# Altium footprint library Miscellaneous$.PcbLib: 44 footprints (part 2 of 3)
Each footprint in its own frame and in the unit in brackets; x right, y up, seen from the top. Pads: shape width x height; smd on the part's side, far side on the other; paste and mask are expansions set on the pad; w line width, h text height; cw(c..) or ccw(c..) is an arc to the next point about the centre after c.
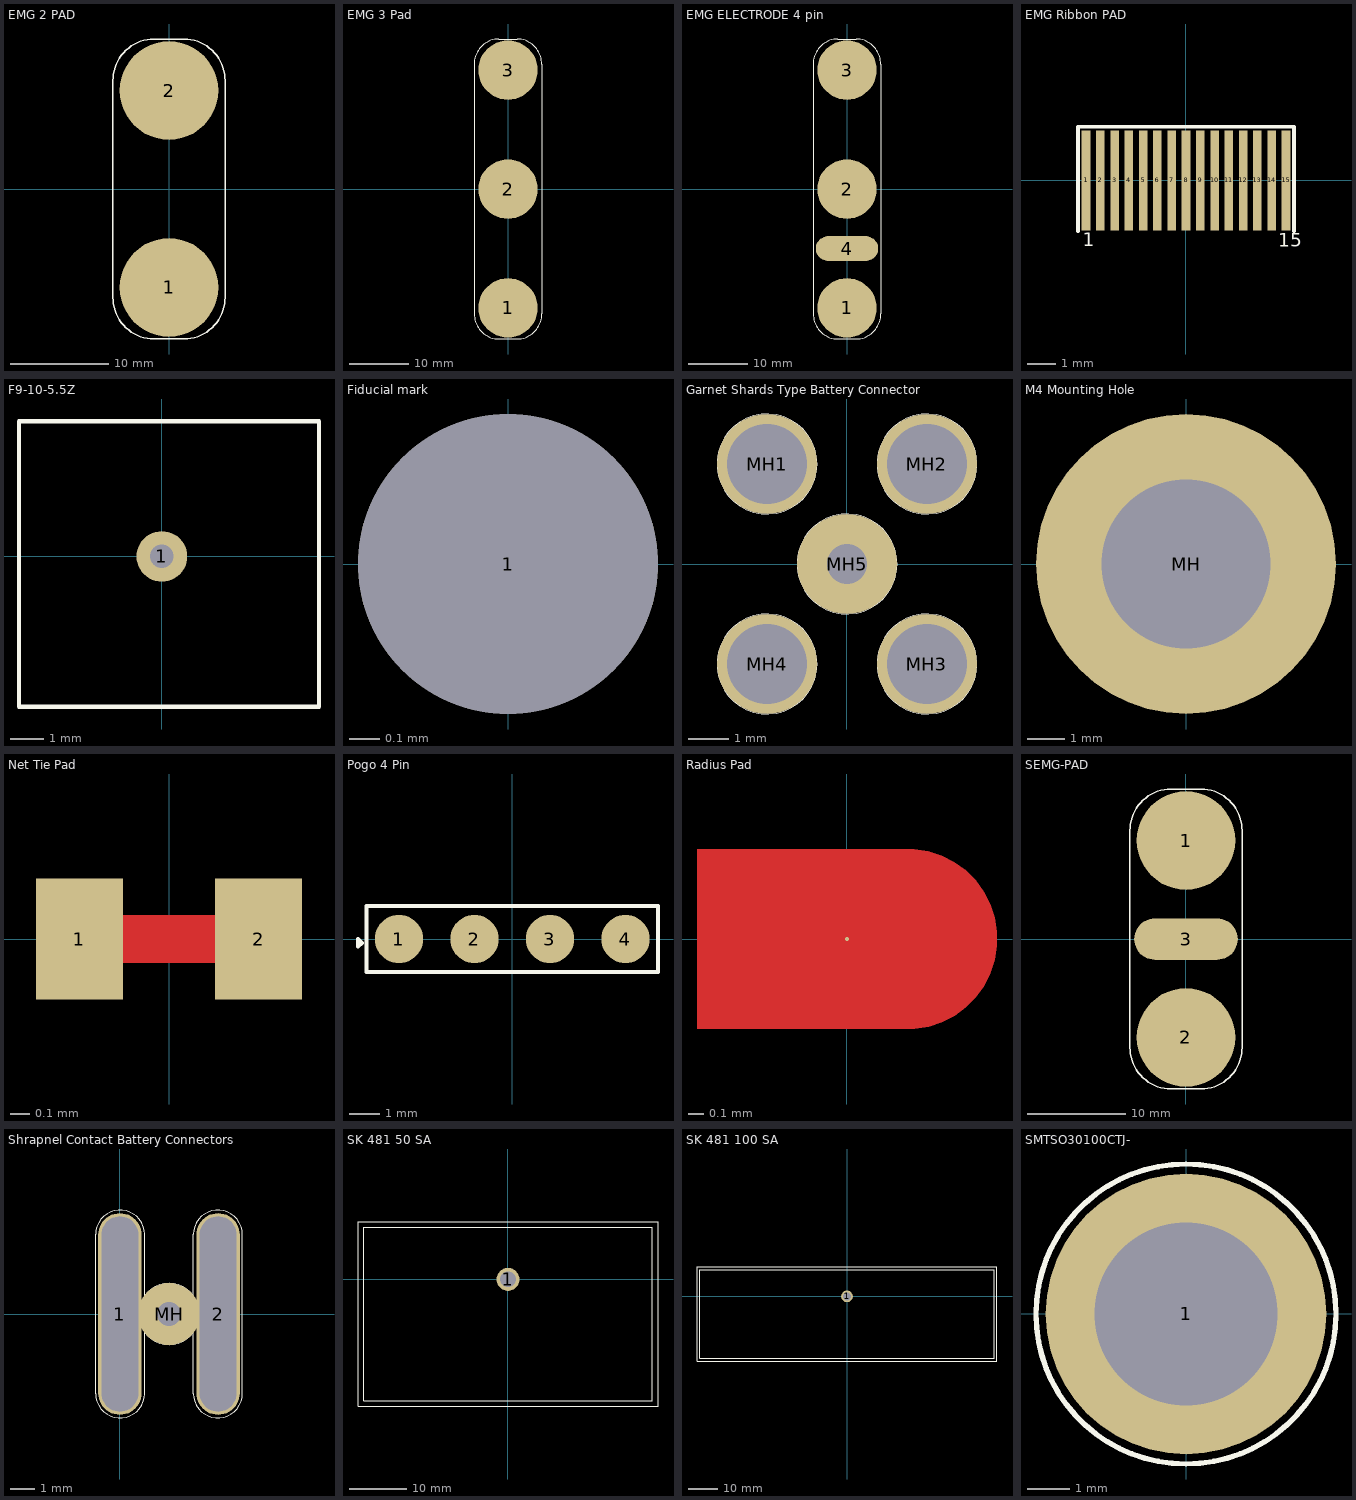
[diagram p1: the footprints below, top view; thin cyan lines are the x and y axes]

## EMG 2 PAD [mm]
pads (2):
  round 10 smd: 1(0,-9.987) 2(0,9.987)
Top Overlay:
  lines w0.127: -5.683,-10.966 ccw(c-1.484,-11.013) -1.531,-15.213 1.531,-15.213 ccw(c1.483,-11.013) 5.683,-10.966 5.683,10.966 ccw(c1.483,11.013) 1.531,15.213 -1.531,15.213 ccw(c-1.484,11.013) -5.683,10.966 -5.683,-10.966

## EMG 3 Pad [mm]
pads (3):
  round 10 smd: 1(0,-20) 2(0,-0.026) 3(0,20)
Top Overlay:
  lines w0.127: -5.683,-20.979 ccw(c-1.484,-21.026) -1.531,-25.225 1.531,-25.225 ccw(c1.483,-21.026) 5.683,-20.979 5.683,20.979 ccw(c1.483,21.026) 1.531,25.225 -1.531,25.225 ccw(c-1.484,21.026) -5.683,20.979 -5.683,-20.978

## EMG ELECTRODE 4 pin [mm]
pads (4):
  round 10 smd: 1(0,-19.974) 2(0,0) 3(0,20.026)
  oval 10.5x4.2 smd: 4(0,-10)
Top Overlay:
  lines w0.127: -5.683,-20.953 ccw(c-1.484,-21) -1.531,-25.2 1.531,-25.2 ccw(c1.483,-21) 5.683,-20.953 5.683,21.004 ccw(c1.483,21.051) 1.531,25.251 -1.531,25.251 ccw(c-1.484,21.051) -5.683,21.004 -5.683,-20.953

## EMG Ribbon PAD [mm]
pads (15):
  rect 0.3x3.5 smd mask+0.08: 1(-3.5,0) 2(-3,0) 3(-2.5,0) 4(-2,0) 5(-1.5,0) 6(-1,0) 7(-0.5,0) 8(0,0) 9(0.5,0) 10(1,0) 11(1.5,0) 12(2,0) 13(2.5,0) 14(3,0) 15(3.5,0)
Top Overlay:
  lines w0.127: -3.779,-1.778 -3.779,1.88 3.779,1.88 3.779,-1.778
  text "1" at -3.607,-2.464 h0.8
  text "15" at 3.236,-2.48 h0.8

## F9-10-5.5Z [mil]
pads (1):
  round 60 hole 27.56: 1(0,0)
Top Overlay:
  lines w5: -169,-178 186,-178 186,160 -169,160 -169,-178
3D body "F9-10-5.5Z.STEP": height 362.22, standoff -39.37, extent -167.54,-176.08 185.01,158.95

## Fiducial mark [mm]
pads (1):
  round 1 hole 1 paste-2539.97 mask+1: 1(0,0)

## Garnet Shards Type Battery Connector [mm]
pads (5):
  round 2.5 hole 2: MH1(-2,2.5) MH2(2,2.5) MH3(2,-2.5) MH4(-2,-2.5)
  round 2.5 hole 1: MH5(0,0)
Top Overlay:
  circle w0.025: c2,-2.5 r1.25
  circle w0.025: c2,-2.5 r1
  circle w0.025: c-2,-2.5 r1.25
  circle w0.025: c-2,-2.5 r1
  circle w0.025: c-2,2.5 r1.25
  circle w0.025: c-2,2.5 r1
  circle w0.025: c0,0 r1.25
  circle w0.025: c0,0 r0.5
  circle w0.025: c2,2.5 r1.25
  circle w0.025: c2,2.5 r1
  circle w0.025: c-2,2.5 r1.25
  circle w0.025: c2,2.5 r1.25
  circle w0.025: c0,0 r1.25
  circle w0.025: c2,-2.5 r1.25
  circle w0.025: c-2,-2.5 r1.25

## M4 Mounting Hole [mm]
pads (1):
  round 8 hole 4.5: MH(0,0)

## Net Tie Pad [mil]
pads (2):
  rect 18x25 smd mask-10: 1(-18.5,0) 2(18.5,0)
Top Layer:
  rectangle: -15,-5 15,5

## Pogo 4 Pin [mm]
pads (4):
  round 1.6 smd: 1(-3.75,0) 2(-1.25,0) 3(1.25,0) 4(3.75,0)
Top Overlay:
  lines w0.127: -5.105,-0.254 -5.105,0 -4.978,-0.127 -5.105,-0.254 ; -4.826,-1.092 -4.826,1.092 4.826,1.092 4.826,-1.092 -4.826,-1.092

## Radius Pad [mil]
pads (1):
  round 1 smd: 1(0,0)
Top Layer:
  region: -39.44,-23.62 -39.44,23.62 15.81,23.62 17.67,23.62 21.34,23.04 24.87,21.9 28.18,20.21 31.19,18.03 33.81,15.41 36,12.41 37.69,9.1 38.84,5.57 39.43,1.91 39.44,-1.81 38.87,-5.47 37.73,-9.01 36.05,-12.32 33.88,-15.33 31.26,-17.97 28.27,-20.16 24.96,-21.86 21.44,-23.02 17.77,-23.61 15.92,-23.62 15.91,-23.62

## SEMG-PAD [mm]
pads (3):
  round 10 smd: 1(0,9.987) 2(0,-9.987)
  oval 10.5x4.2 smd: 3(0,-0.013)
Top Overlay:
  lines w0.127: -5.683,-10.966 ccw(c-1.483,-11.013) -1.531,-15.213 1.531,-15.213 ccw(c1.484,-11.013) 5.683,-10.966 5.683,10.966 ccw(c1.484,11.013) 1.531,15.213 -1.531,15.213 ccw(c-1.483,11.013) -5.683,10.966 -5.683,-10.966

## Shrapnel Contact Battery Connectors [mil]
pads (3):
  oval 69.9x324.8 hole 59 slot 314 at 90 deg: 1(0,0) 2(158,0)
  round 100 hole 39.37: MH(79,0)
Top Overlay:
  circle w0.5: c79,0 r19.68
  lines w0.5: -39.11,-127.95 ccw(c0.26,-127.95) 39.63,-127.95 ; -39.11,-127.95 ccw(c0.26,-127.95) 39.63,-127.95 ; -39.11,-127.95 -39.11,127.95 ; -39.11,-127.95 -39.11,127.95 ; -39.11,127.95 cw(c0.26,127.95) 39.63,127.95 ; -39.11,127.95 cw(c0.26,127.95) 39.63,127.95 ; 39.63,-127.95 39.63,-29.53 ; 39.63,-127.95 39.63,-29.53 ; 39.63,-29.53 ccw(c79,0) 118.37,-29.53 ; 39.63,-29.53 ccw(c79,0) 118.37,-29.53 ; 39.63,-29.53 39.63,29.53 ; 39.63,-29.53 39.63,29.53 ; 39.63,29.53 cw(c79,0) 118.37,29.53 ; 39.63,29.53 cw(c79,0) 118.37,29.53 ; 39.63,29.53 39.63,127.95 ; 39.63,29.53 39.63,127.95 ; 118.37,-127.95 ccw(c157.74,-127.95) 197.11,-127.95 ; 118.37,-127.95 ccw(c157.74,-127.95) 197.11,-127.95 ; 118.37,-127.95 118.37,-29.53 ; 118.37,-127.95 118.37,-29.53 ; 118.37,-29.53 118.37,29.53 ; 118.37,-29.53 118.37,29.53 ; 118.37,29.53 118.37,127.95 ; 118.37,29.53 118.37,127.95 ; 118.37,127.95 cw(c157.74,127.95) 197.11,127.95 ; 118.37,127.95 cw(c157.74,127.95) 197.11,127.95 ; 197.11,-127.95 197.11,127.95 ; 197.11,-127.95 197.11,127.95 ; -29.27,-127.95 ccw(c0.26,-127.95) 29.79,-127.95 29.79,127.95 ccw(c0.26,127.95) -29.27,127.95 -29.27,-127.95 ; 128.21,-127.95 ccw(c157.74,-127.95) 187.27,-127.95 187.27,127.95 ccw(c157.74,127.95) 128.21,127.95 128.21,-127.95

## SK 481 50 SA [mm]
pads (1):
  round 4 hole 2.7: 1(0,0)
Top Overlay:
  lines w0.127: -26,-22 26,-22 26,10 -26,10 -26,-22 ; -25,-21 25,-21 25,9 -25,9 -25,-21
3D body "sk481_50mm.STEP": height 45.2, standoff 0.2, extent -25,-21 25,9

## SK 481 100 SA [mm]
pads (1):
  round 4 hole 2.7: 1(0,0)
Top Overlay:
  lines w0.127: -51,-22 51,-22 51,10 -51,10 -51,-22 ; -50,-21 50,-21 50,9 -50,9 -50,-21
3D body "sk481_100mm.STEP": height 45.2, standoff 0.2, extent -50,-21 50,9

## SMTSO30100CTJ- [mm]
pads (1):
  round 6.6 / inner round 0 / far side round 0 hole 4.3: 1(0,0)
Top Overlay:
  circle w0.127: c0,0 r3.527
3D body "C2916370 (1).step": height 10.96, standoff -1.57, extent -2.78,-2.779 2.78,2.77